# Altium footprint library SamacSys.PcbLib: 1008 footprints (part 1 of 63)
Each footprint in its own frame and in the unit in brackets; x right, y up, seen from the top. Pads: shape width x height; smd on the part's side, far side on the other; paste and mask are expansions set on the pad; w line width, h text height; cw(c..) or ccw(c..) is an arc to the next point about the centre after c.
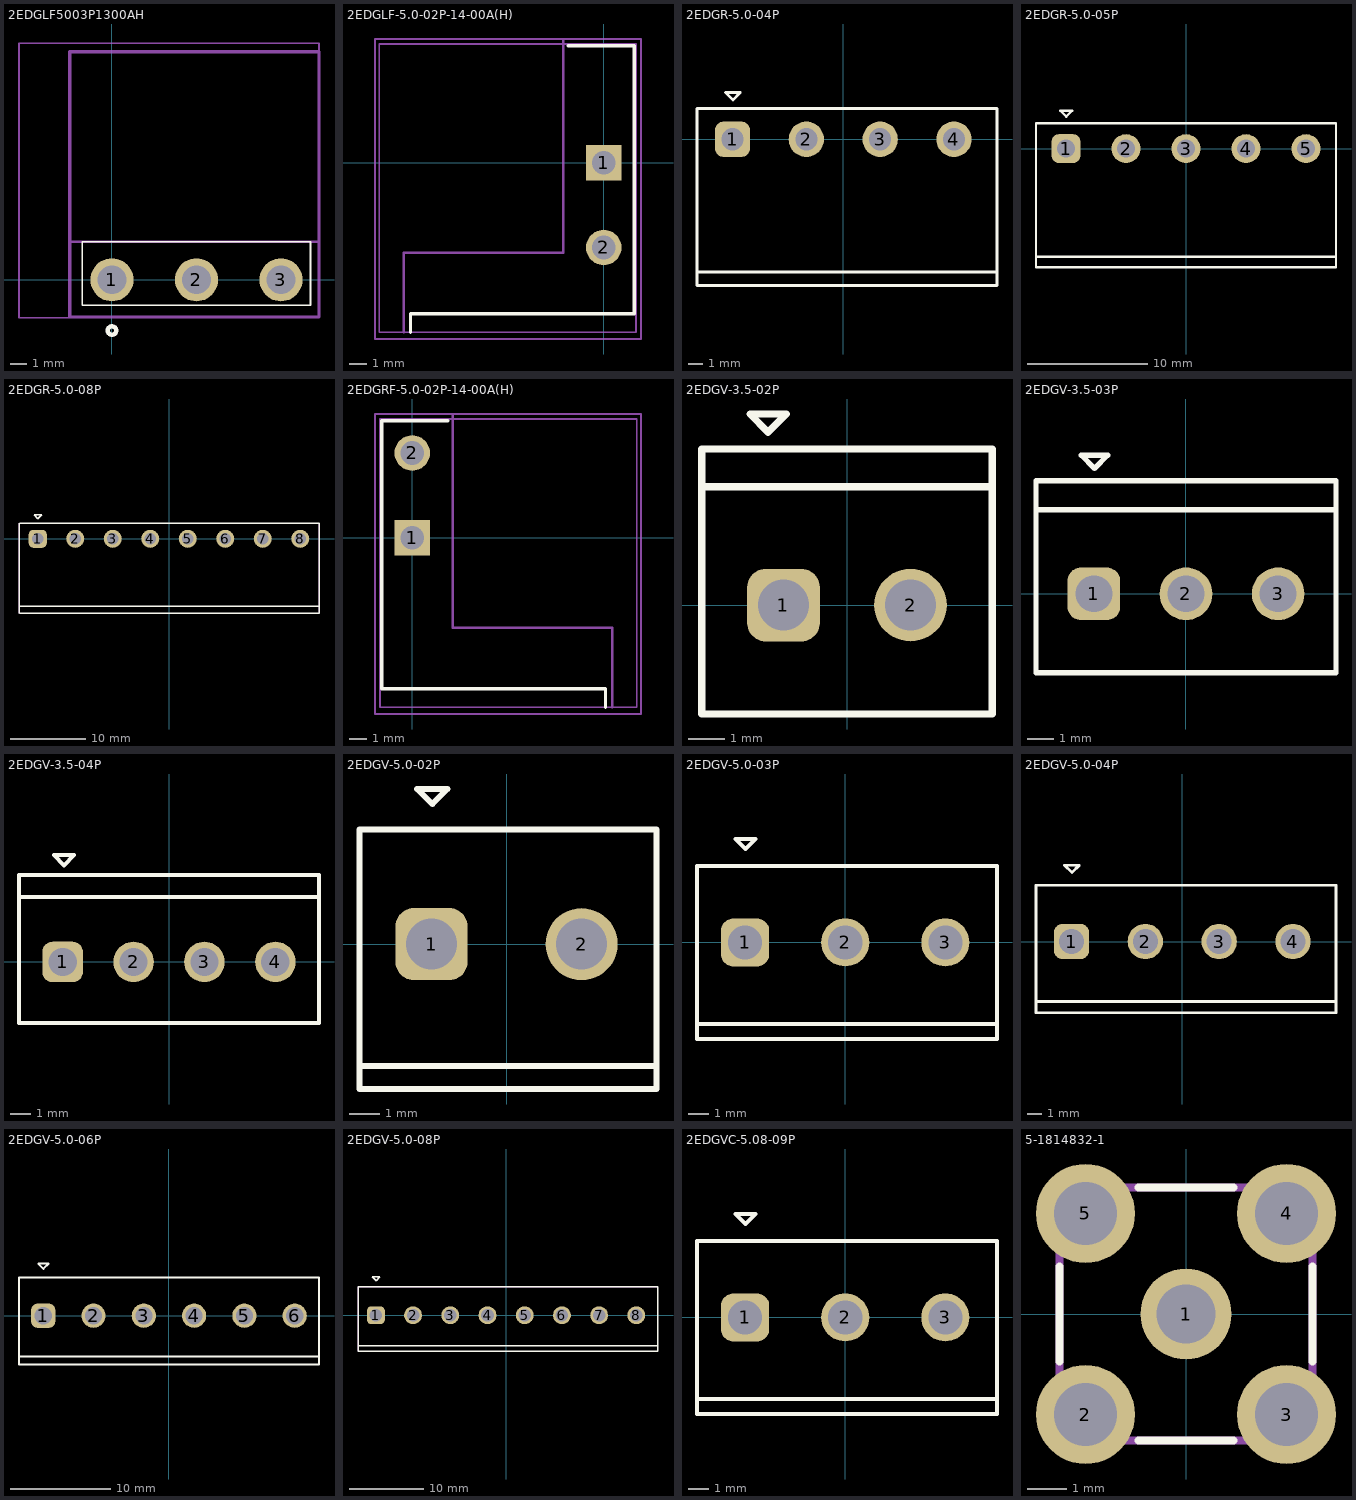
[diagram p0: the footprints below, top view; thin cyan lines are the x and y axes]

## 2EDGLF5003P1300AH [mm]
pads (3):
  round 2.55 hole 1.7: 1(0,0) 2(5,0) 3(10,0)
Top Overlay:
  circle w0.254: c0,-3 r0.25
  lines w0.1: -1.75,-1.5 -1.75,2.25 11.75,2.25 11.75,-1.5 -1.75,-1.5
Assembly:
  lines w0.15: -2.5,2.25 12.25,2.25
  lines w0.2: -2.5,-2.2 -2.5,13.5 12.25,13.5 12.25,-2.2 -2.5,-2.2
  text "PCB Edge" at 2.75,1.264 h1.5
Countryard:
  lines w0.1: -5.5,-2.25 -5.5,14 12.25,14 12.25,-2.25 -5.5,-2.25
3D body "2EDGLF-5.0-03P-1Y-00AH.stp": height 11, standoff -4, extent -4.9,-1.3 11.4,13.3

## 2EDGLF-5.0-02P-14-00A(H) [mm]
pads (2):
  rect 2.1x2.1 hole 1.4: 1(0,0)
  round 2.1 hole 1.4: 2(0,-5)
Top Overlay:
  lines w0.2: -11.4,-10 -11.4,-8.9 1.8,-8.9 1.8,6.9 -2.1,6.9
  text "." at 2.7,-0.2 h3
Assembly:
  lines w0.1: -13.25,-10 -13.25,7 1.9,7 1.9,-10 -13.25,-10
  lines w0.15: -11.8,-10 -11.8,-5.3 -2.4,-5.3 -2.4,7.2
Countryard:
  lines w0.1: -13.5,-10.4 -13.5,7.3 2.2,7.3 2.2,-10.4 -13.5,-10.4
3D body "2EDGLF-5.0-02P-1Y-00A(H).stp": height 6, standoff -4, extent -13.3,-9.65 1.3,6.65

## 2EDGR-5.0-04P [mm]
height 14
pads (4):
  rrect50% 2.4x2.4 hole 1.5: 1(-7.5,0)
  round 2.4 hole 1.5: 2(-2.5,0) 3(2.5,0) 4(7.5,0)
Top Overlay:
  lines w0.2: -9.906,-9 10.414,-9 ; -9.906,-9.9 10.414,-9.9 10.414,2.1 -9.906,2.1 -9.906,-9.9 ; -7.976,3.167 -6.976,3.167 -7.476,2.667 -7.976,3.167
Countryard:
  lines w0.1: -9.906,-9.9 10.414,-9.9 10.414,2.1 -9.906,2.1 -9.906,-9.9
3D body "2EDGR-5.0-04P-1Y-100A&Z(H).stp": height 8.6, standoff -3.1, extent -9.5,-10 10.5,2

## 2EDGR-5.0-05P [mm]
height 14
pads (5):
  rrect50% 2.4x2.4 hole 1.5: 1(-10,0)
  round 2.4 hole 1.5: 2(-5,0) 3(0,0) 4(5,0) 5(10,0)
Top Overlay:
  lines w0.2: -12.5,-9 12.5,-9 ; -12.5,-9.9 -12.5,2.1 12.5,2.1 12.5,-9.9 -12.5,-9.9 ; -10.476,3.167 -9.976,2.667 -9.476,3.167 -10.476,3.167
Countryard:
  lines w0.1: -12.5,-9.9 -12.5,2.1 12.5,2.1 12.5,-9.9 -12.5,-9.9
3D body "2EDGR-5.0-05P-1Y-100A&Z(H).stp": height 8.6, standoff -3.1, extent -12.5,-10 12.5,2

## 2EDGR-5.0-08P [mm]
height 14
pads (8):
  rrect50% 2.4x2.4 hole 1.5: 1(-17.5,0)
  round 2.4 hole 1.5: 2(-12.5,0) 3(-7.5,0) 4(-2.5,0) 5(2.5,0) 6(7.5,0) 7(12.5,0) 8(17.5,0)
Top Overlay:
  lines w0.2: -20,-9.9 -20,2.1 ; -19.906,-9.9 0.414,-9.9 ; -19.906,-9 0.414,-9 ; -19.906,2.1 0.414,2.1 ; 0,-9.9 20,-9.9 20,2.1 0,2.1 ; 0,-9 20,-9 ; -17.976,3.167 -16.976,3.167 -17.476,2.667 -17.976,3.167
Countryard:
  lines w0.1: -20,-9.9 -20,2.1 ; -19.906,-9.9 0.414,-9.9 ; -19.906,2.1 0.414,2.1 ; 0,-9.9 20,-9.9 20,2.1 0,2.1
3D body "2EDGR-5.0-04P-1Y-100A&Z(H).stp": height 8.6, standoff -3.1, extent -20,-10 0,2
3D body "2EDGR-5.0-04P-1Y-100A&Z(H).stp": height 8.6, standoff -3.1, extent 0,-10 20,2

## 2EDGRF-5.0-02P-14-00A(H) [mm]
pads (2):
  rect 2.1x2.1 hole 1.4: 1(0,0)
  round 2.1 hole 1.4: 2(0,5)
Top Overlay:
  lines w0.2: 2.1,6.9 -1.8,6.9 -1.8,-8.9 11.4,-8.9 11.4,-10
  text "." at -2.7,-0.2 h3
Assembly:
  lines w0.1: -1.9,-10 -1.9,7 13.25,7 13.25,-10 -1.9,-10
  lines w0.15: 2.4,7.2 2.4,-5.3 11.8,-5.3 11.8,-10
Countryard:
  lines w0.1: -2.2,-10.4 -2.2,7.3 13.5,7.3 13.5,-10.4 -2.2,-10.4

## 2EDGV-3.5-02P [mm] "3D with 15EDGKA-3.5-02P"
height 14
pads (2):
  rrect50% 2x2 hole 1.4: 1(-1.75,0)
  round 2 hole 1.4: 2(1.75,0)
Top Overlay:
  lines w0.2: -4,3.264 3.906,3.264 ; -4,-3 4,-3 4,4.3 -4,4.3 -4,-3 ; -2.676,5.267 -2.176,4.767 -1.676,5.267 -2.676,5.267
Countryard:
  lines w0.1: -4,-3 4,-3 4,4.3 -4,4.3 -4,-3
3D body "15EDGKA-3.5-02P-1Y-100A(H).stp": height 22.48, standoff 3.38, extent -3.9,-5.25 3.9,5.25
3D body "15EDGVC-3.5-02P-14-00A(H).stp": height 9.2, standoff -3.4, extent -3.9,-2.84 3.9,4.4

## 2EDGV-3.5-03P [mm] "3D with 15EDGKA-3.5-03P"
height 14
pads (3):
  rrect50% 2x2 hole 1.4: 1(-3.5,0)
  round 2 hole 1.4: 2(0,0) 3(3.5,0)
Top Overlay:
  lines w0.2: -5.7,3.2 5.7,3.2 ; -5.7,-3 5.7,-3 5.7,4.3 -5.7,4.3 -5.7,-3 ; -3.976,5.267 -3.476,4.767 -2.976,5.267 -3.976,5.267
Countryard:
  lines w0.1: -5.7,-3 5.7,-3 5.7,4.3 -5.7,4.3 -5.7,-3
3D body "15EDGKA-3.5-03P-1Y-100A(H).stp": height 22.48, standoff 3.38, extent -5.65,-5.2 5.65,5.3
3D body "15EDGVC-3.5-03P-14-00A(H).stp": height 9.2, standoff -3.4, extent -5.65,-3 5.65,4.24

## 2EDGV-3.5-04P [mm] "3D with 15EDGKA-3.5-04P"
height 14
pads (4):
  rrect50% 2x2 hole 1.4: 1(-5.25,0)
  round 2 hole 1.4: 2(-1.75,0) 3(1.75,0) 4(5.25,0)
Top Overlay:
  lines w0.2: -7.4,3.2 7.4,3.2 ; -7.4,-3 7.4,-3 7.4,4.3 -7.4,4.3 -7.4,-3 ; -5.676,5.267 -5.176,4.767 -4.676,5.267 -5.676,5.267
Countryard:
  lines w0.1: -7.4,-3 7.4,-3 7.4,4.3 -7.4,4.3 -7.4,-3
3D body "15EDGVC-3.5-04P-14-00A(H).stp": height 9.2, standoff -3.4, extent -7.4,-3.04 7.4,4.2
3D body "15EDGKA-3.5-04P-1Y-100A(H).stp": height 22.48, standoff 3.38, extent -7.4,-5.2 7.4,5.3

## 2EDGV-5.0-02P [mm]
height 14
pads (2):
  rrect50% 2.4x2.4 hole 1.7: 1(-2.5,0)
  round 2.4 hole 1.7: 2(2.5,0)
Top Overlay:
  lines w0.2: -4.906,-4.064 5,-4.064 ; -4.906,-4.826 -4.906,3.81 5,3.81 5,-4.826 -4.906,-4.826 ; -2.976,5.167 -1.976,5.167 -2.476,4.667 -2.976,5.167
Countryard:
  lines w0.1: -4.906,-4.826 5,-4.826 5,3.81 -4.906,3.81 -4.906,-4.826
3D body "2EDGV-5.0-02P-14-100A(H).stp": height 12, standoff -4, extent -4.906,-4.826 5.094,3.774
3D body "2EDGKF-5.0-02P-14-1000A.stp": height 21.6, standoff 3.4, extent -5,-6.3 5,8.7

## 2EDGV-5.0-03P [mm]
height 14
pads (3):
  rrect50% 2.4x2.4 hole 1.7: 1(-5,0)
  round 2.4 hole 1.7: 2(0,0) 3(5,0)
Top Overlay:
  lines w0.2: -7.406,-4.064 7.58,-4.064 ; -7.406,-4.826 7.58,-4.826 7.58,3.81 -7.406,3.81 -7.406,-4.826 ; -5.476,5.167 -4.476,5.167 -4.976,4.667 -5.476,5.167
Countryard:
  lines w0.1: -7.406,-4.826 7.58,-4.826 7.58,3.81 -7.406,3.81 -7.406,-4.826
3D body "2EDGV-5.0-03P-14-100A(H).stp": height 12, standoff -4, extent -7.406,-4.826 7.594,3.774
3D body "2EDGKF-5.0-03P-14-1000A.stp": height 21.6, standoff 3.4, extent -7.54,-6.11 7.46,8.89

## 2EDGV-5.0-04P [mm]
height 14
pads (4):
  rrect50% 2.4x2.4 hole 1.7: 1(-7.5,0)
  round 2.4 hole 1.7: 2(-2.5,0) 3(2.5,0) 4(7.5,0)
Top Overlay:
  lines w0.2: -9.906,-4.064 10.414,-4.064 ; -9.906,-4.826 -9.906,3.81 10.414,3.81 10.414,-4.826 -9.906,-4.826 ; -7.976,5.167 -7.476,4.667 -6.976,5.167 -7.976,5.167
Countryard:
  lines w0.1: -9.906,-4.826 -9.906,3.81 10.414,3.81 10.414,-4.826 -9.906,-4.826
3D body "2EDGKD-5.0-04P-1Y-00A&Z(H).stp": height 27.8, standoff 2, extent -10.1,-11.25 10.6,3.75
3D body "2EDGV-5.0-04P-14-100A(H).stp": height 12, standoff -4, extent -9.746,-4.826 10.254,3.774

## 2EDGV-5.0-06P [mm]
height 14
pads (6):
  rrect50% 2.4x2.4 hole 1.7: 1(-12.5,0)
  round 2.4 hole 1.7: 2(-7.5,0) 3(-2.5,0) 4(2.5,0) 5(7.5,0) 6(12.5,0)
Top Overlay:
  lines w0.2: -14.906,-4.826 14.914,-4.826 ; -14.906,-4.818 -14.906,3.818 ; -14.906,-4.064 14.914,-4.064 ; -14.906,3.81 14.914,3.81 ; 14.906,-4.826 14.906,3.81 ; -12.976,5.167 -11.976,5.167 -12.476,4.667 -12.976,5.167
Countryard:
  lines w0.1: -14.906,-4.826 14.914,-4.826 ; -14.906,-4.818 -14.906,3.818 ; -14.906,3.81 14.914,3.81 ; 14.906,-4.826 14.906,3.81
3D body "2EDGV-5.0-06P-1Y-100A&Z(H).stp": height 12, standoff -4, extent -15,-4.75 15,3.85

## 2EDGV-5.0-08P [mm]
height 14
pads (8):
  rrect50% 2.4x2.4 hole 1.7: 1(-17.5,0)
  round 2.4 hole 1.7: 2(-12.5,0) 3(-7.5,0) 4(-2.5,0) 5(2.5,0) 6(7.5,0) 7(12.5,0) 8(17.5,0)
Top Overlay:
  lines w0.2: -19.906,-4.064 0.414,-4.064 ; 0.094,-4.826 20.414,-4.826 20.414,3.81 0.094,3.81 ; 0.094,-4.064 20.414,-4.064 ; 0.414,-4.826 -19.906,-4.826 -19.906,3.81 0.414,3.81 ; -17.976,5.167 -16.976,5.167 -17.476,4.667 -17.976,5.167
Countryard:
  lines w0.1: 0.094,-4.826 20.414,-4.826 20.414,3.81 0.094,3.81 ; 0.414,-4.826 -19.906,-4.826 -19.906,3.81 0.414,3.81
3D body "2EDGV-5.0-04P-14-100A(H).stp": height 12, standoff -4, extent 0.254,-4.826 20.254,3.774
3D body "2EDGV-5.0-04P-14-100A(H).stp": height 12, standoff -4, extent -19.746,-4.826 0.254,3.774
3D body "2EDGKD-5.0-08P-1Y-00A&Z(H).stp": height 29.8, standoff 4, extent -20.1,-11.25 20.6,3.75

## 2EDGVC-5.08-09P [mm]
height 14
pads (3):
  rrect50% 2.4x2.4 hole 1.7: 1(-5,0)
  round 2.4 hole 1.7: 2(0,0) 3(5,0)
Top Overlay:
  lines w0.2: -7.406,-4.064 7.58,-4.064 ; -7.406,-4.826 7.58,-4.826 7.58,3.81 -7.406,3.81 -7.406,-4.826 ; -5.476,5.167 -4.476,5.167 -4.976,4.667 -5.476,5.167
Countryard:
  lines w0.1: -7.406,-4.826 7.58,-4.826 7.58,3.81 -7.406,3.81 -7.406,-4.826
3D body "2EDGVC-5.08-09P-1Y-100AH.stp": height 12, standoff -4, extent -39.084,-5.334 8.636,3.266

## 5-1814832-1 [mm]
pads (5):
  round 2.3 hole 1.5: 1(0,0)
  round 2.5 hole 1.6: 2(-2.54,-2.54) 3(2.54,-2.54) 4(2.54,2.54) 5(-2.54,2.54)
Top Overlay:
  lines w0.2: -3.2,-1.2 -3.2,1.2 ; -1.2,-3.2 1.2,-3.2 ; -1.2,3.2 1.2,3.2 ; 3.2,-1.2 3.2,1.2
Assembly:
  lines w0.2: -3.2,-3.2 -3.2,3.2 3.2,3.2 3.2,-3.2 -3.2,-3.2
3D body "5-1814832-1.stp": height 9.5, standoff -4, extent -3.42,-3.432 3.42,3.432